# Altium schematic symbol library SMBJ13A.SchLib: 1 symbol
Pins are listed as number, name and electrical type; pins without a type are passive.

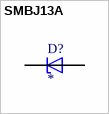
[diagram p0: symbol SMBJ13A]

## SMBJ13A
designator D?
600W, 15.2V, 5%, Unidirectional, TVS; MF: Taiwan Semiconductor Corporation; MP: SMBJ13A; SnapEDA_Link: https://www.snapeda.com/parts/SMBJ13A/taiwan/view-part/?ref=snap; Package: SMD-2 Taiwan Semiconductor; Value: *; Check_prices: https://www.snapeda.com/parts/SMBJ13A/taiwan/view-part/?ref=eda
footprint DIOM4336X265N
pins: A, C